# Altium integrated library RT0603BRD0710KL.IntLib: 1 symbol
Pins are listed as number, name and electrical type; pins without a type are passive.

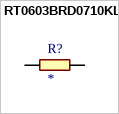
[diagram p0: symbol RT0603BRD0710KL]

## RT0603BRD0710KL
designator R?
10 kOhms Â±0.1% 0.1W, 1/10W Chip Resistor 0603 (1608 Metric) - Thin Film; MF: Yageo; MP: RT0603BRD0710KL; SnapEDA_Link: https://www.snapeda.com/parts/RT0603BRD0710KL/Yageo/view-part/?ref=snap; Package: SMD-2 Yageo; Value: *; Check_prices: https://www.snapeda.com/parts/RT0603BRD0710KL/Yageo/view-part/?ref=eda
footprint 0603
pins: 1, 2